# Altium schematic symbol library LM2576.SchLib: 1 symbol
Pins are listed as number, name and electrical type; pins without a type are passive.

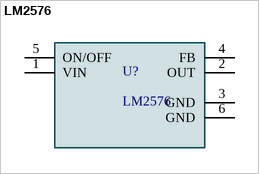
[diagram p0: symbol LM2576]

## LM2576
designator U?
SIMPLE SWITCHER&reg; 4V to 60V, 3A Low Component Count Step-Down Regulator 5-DDPAK/TO-263 -40 to 125; MP: LM2576HVSX-ADJ/NOPB; MF: Texas Instruments; Package: TO-263-5 Texas Instruments; Price: None; Availability: Warning; Purchase-URL: https://pricing.snapeda.com/search/part/LM2576HVSX-ADJ/NOPB/?ref=eda; Value: *; Check_prices: https://www.snapeda.com/parts/LM2576HVSX-ADJ/NOPB/Texas%20Instruments/view-part/493055/?ref=eda; SnapEDA_Link: https://www.snapeda.com/parts/LM2576HVSX-ADJ/NOPB/Texas%20Instruments/view-part/493055/?ref=snap
footprint LM2576 (TO-263-5)
pins: 1 VIN (power), 2 OUT (power), 3 GND, 4 FB (power), 5 ON/OFF, 6 GND